# EAGLE library part PCA9615DPZ (library PCA9615DPZ)
Interface - Signal Buffers, Repeaters PCA9615DP Source: Datasheet <https://www.mouser.se/datasheet/2/302/PCA9615-1127690.pdf>
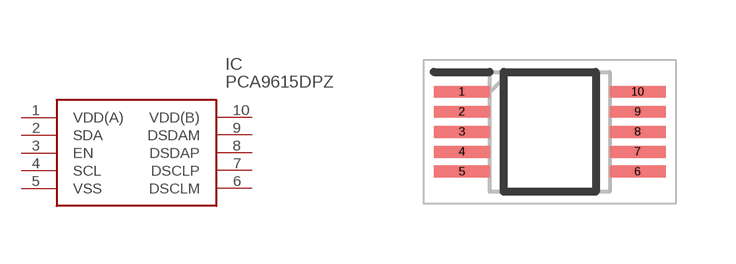
[diagram p0: symbol with the pads of SOP50P490X110-10N; footprint SOP50P490X110-10N]

Designator prefix IC

## PCA9615DPZ (Arrow_Part_Number: PCA9615DPZ; Arrow_Price-Stock: https://www.arrow.com/en/products/pca9615dpz/nxp-semiconductors?utm_currency=USD&region=nac; Description: Interface - Signal Buffers, Repeaters PCA9615DP; Height: 1.1mm; Manufacturer_Name: NXP; Manufacturer_Part_Number: PCA9615DPZ; Mouser_Part_Number: 771-PCA9615DPZ; Mouser_Price-Stock: https://www.mouser.co.uk/ProductDetail/NXP-Semiconductors/PCA9615DPZ?qs=pBJMDPsKWf3nyRapr7Zy5w%3D%3D)  [SOP50P490X110-10N]
1  VDD(A)
2  SDA
3  EN
4  SCL
5  VSS
6  DSCLM
7  DSCLP
8  DSDAP
9  DSDAM
10  VDD(B)

## Footprint SOP50P490X110-10N (pad centres in mm)
SOT552-1
smd 1.4 x 0.3: 1 -2.2,1; 2 -2.2,0.5; 3 -2.2,0; 4 -2.2,-0.5; 5 -2.2,-1; 6 2.2,-1; 7 2.2,-0.5; 8 2.2,0; 9 2.2,0.5; 10 2.2,1